# Altium footprint library Dual-Color_LED.PcbLib: 1 footprints
Each footprint in its own frame and in the unit in brackets; x right, y up, seen from the top. Pads: shape width x height; smd on the part's side, far side on the other; paste and mask are expansions set on the pad; w line width, h text height; cw(c..) or ccw(c..) is an arc to the next point about the centre after c.
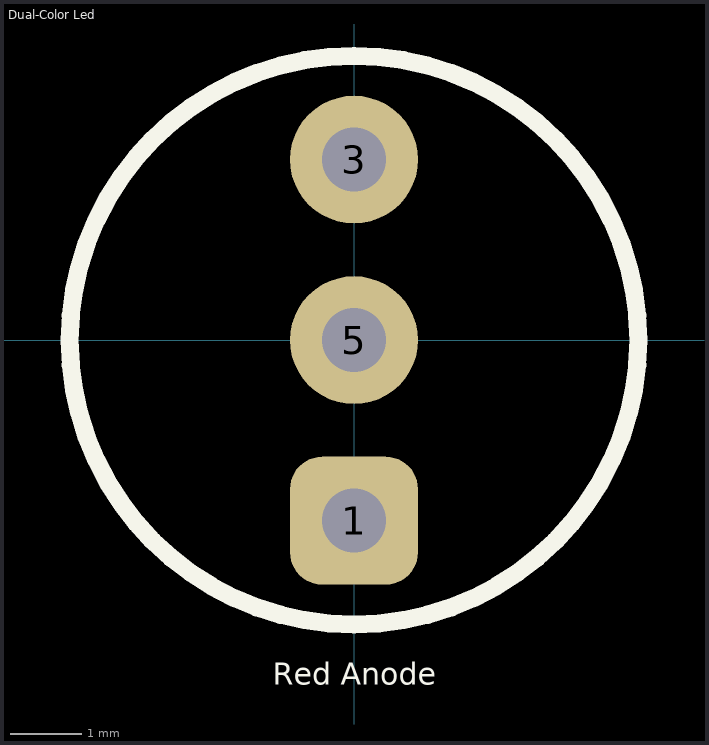
[diagram p0: the footprint, top view; thin cyan lines are the x and y axes]

## Dual-Color Led [mm] "Dual-Color Led radial pitch 2.54mm"
pads (3):
  rrect50% 1.8x1.8 hole 0.9: 1(0,-2.54)
  round 1.8 hole 0.9: 3(0,2.54) 5(0,0)
Top Overlay:
  circle w0.254: c0,0 r4
  text "Red Anode" at -1.143,-4.953 h0.52
3D body "dual-color led 3-pin.step": height 11.8, standoff -21.3, extent -2.647,-2.89 2.647,2.89